# EAGLE library part PC817-4CH-MODULE (library moto-anomaly)
PC817-4CH-MODULE PC817 4 kanal optokuplor izolasyon karti (12V -> 3.3V salt-okunur tap). Kart: 48.0 x 41.0 mm - Guven: L STEP: GrabCAD 'PC817 4 channel optocoupler module' NOT: Giris/cikis klemens sirasi ureticiye gore degisir; mutlaka kartindan kontrol et.
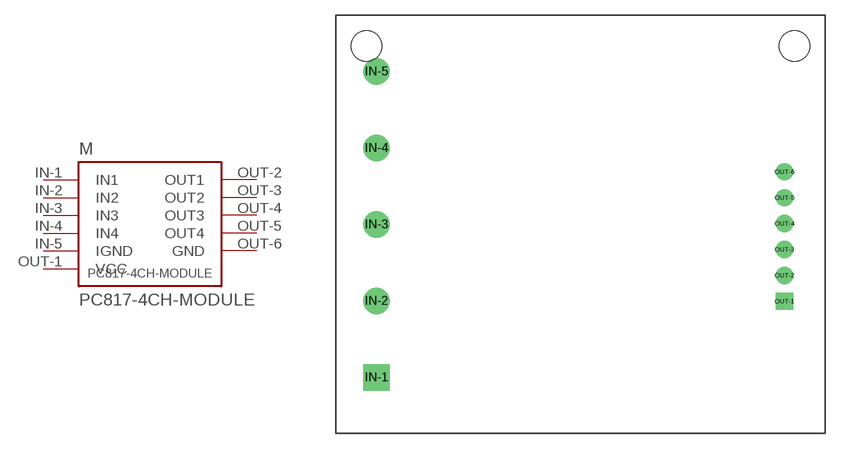
[diagram p4: symbol with the pads of PC817-4CH-MODULE; footprint PC817-4CH-MODULE]

Designator prefix M

## PC817-4CH-MODULE (BOARD_SIZE: 48.0x41.0mm; CONFIDENCE: L)  [PC817-4CH-MODULE]
IN-1  IN1  pas
IN-2  IN2  pas
IN-3  IN3  pas
IN-4  IN4  pas
IN-5  IGND  pas
OUT-1  VCC  pas
OUT-2  OUT1  pas
OUT-3  OUT2  pas
OUT-4  OUT3  pas
OUT-5  OUT4  pas
OUT-6  GND  pas

## Footprint PC817-4CH-MODULE (pad centres in mm)
PC817 4 kanal optokuplor izolasyon karti (12V -> 3.3V salt-okunur tap). | Kart: 48.0 x 41.0 mm | Guven: L
drill 1.3 pad 2.6 square: IN-1 -20,-15
drill 1.3 pad 2.6 round: IN-2 -20,-7.5; IN-3 -20,0; IN-4 -20,7.5; IN-5 -20,15
drill 1 pad 1.7 square: OUT-1 20,-7.55
drill 1 pad 1.7 round: OUT-2 20,-5.01; OUT-3 20,-2.47; OUT-4 20,0.07; OUT-5 20,2.61; OUT-6 20,5.15
hole 3 at -21,17.5
hole 3 at 21,17.5